# Altium footprint library Localisation_Node.PcbLib: 36 footprints (part 3 of 3)
Each footprint in its own frame and in the unit in brackets; x right, y up, seen from the top. Pads: shape width x height; smd on the part's side, far side on the other; paste and mask are expansions set on the pad; w line width, h text height; cw(c..) or ccw(c..) is an arc to the next point about the centre after c.
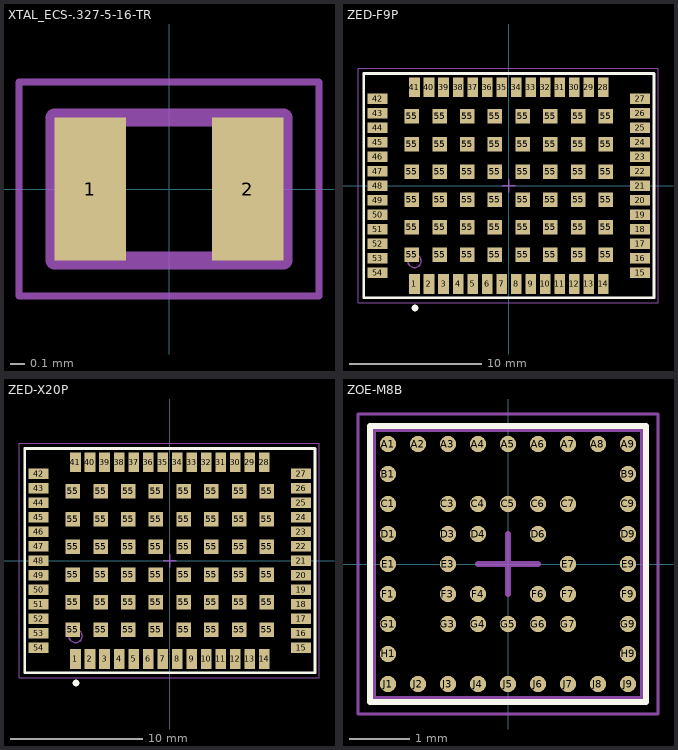
[diagram p2: the footprints below, top view; thin cyan lines are the x and y axes]

## XTAL_ECS-.327-5-16-TR [mm]
pads (2):
  rect 0.5x1 smd: 1(-0.55,0) 2(0.55,0)
Mechanical 13:
  lines w0.127: -0.8,-0.5 0.8,-0.5 0.8,0.5 -0.8,0.5 -0.8,-0.5
Mechanical 15:
  lines w0.05: -1.05,-0.75 1.05,-0.75 1.05,0.75 -1.05,0.75 -1.05,-0.75
3D body "ECS-.327-9-16-TR.STEP": height 0.51, standoff 0.01, extent -0.8,-0.5 0.8,0.5

## ZED-F9P [mm] "Multi-band GNSS receiver"
height 2.2
pads (102):
  rect 0.8x1.5 smd paste-2: 1(-7.15,-7.45) 2(-6.05,-7.45) 3(-4.95,-7.45) 4(-3.85,-7.45) 5(-2.75,-7.45) 6(-1.65,-7.45) 7(-0.55,-7.45) 8(0.55,-7.45) 9(1.65,-7.45) 10(2.75,-7.45) 11(3.85,-7.45) 12(4.95,-7.45) 13(6.05,-7.45) 14(7.15,-7.45) 28(7.15,7.45) 29(6.05,7.45) 30(4.95,7.45) 31(3.85,7.45) 32(2.75,7.45) 33(1.65,7.45) 34(0.55,7.45) 35(-0.55,7.45) 36(-1.65,7.45) 37(-2.75,7.45) 38(-3.85,7.45) 39(-4.95,7.45) 40(-6.05,7.45) 41(-7.15,7.45)
  rect 1.5x0.8 smd paste-2: 15(9.95,-6.6) 16(9.95,-5.5) 17(9.95,-4.4) 18(9.95,-3.3) 19(9.95,-2.2) 20(9.95,-1.1) 21(9.95,0) 22(9.95,1.1) 23(9.95,2.2) 24(9.95,3.3) 25(9.95,4.4) 26(9.95,5.5) 27(9.95,6.6) 42(-9.95,6.6) 43(-9.95,5.5) 44(-9.95,4.4) 45(-9.95,3.3) 46(-9.95,2.2) 47(-9.95,1.1) 48(-9.95,0) 49(-9.95,-1.1) 50(-9.95,-2.2) 51(-9.95,-3.3) 52(-9.95,-4.4) 53(-9.95,-5.5) 54(-9.95,-6.6)
  rect 1.1x1.1 smd paste-2: 55(-7.35,-5.25) 55(-7.35,-3.15) 55(-7.35,-1.05) 55(-7.35,1.05) 55(-7.35,3.15) 55(-7.35,5.25) 55(-5.25,-5.25) 55(-5.25,-3.15) 55(-5.25,-1.05) 55(-5.25,1.05) 55(-5.25,3.15) 55(-5.25,5.25) 55(-3.15,-5.25) 55(-3.15,-3.15) 55(-3.15,-1.05) 55(-3.15,1.05) 55(-3.15,3.15) 55(-3.15,5.25) 55(-1.05,-5.25) 55(-1.05,-3.15) 55(-1.05,-1.05) 55(-1.05,1.05) 55(-1.05,3.15) 55(-1.05,5.25) 55(1.05,-5.25) 55(1.05,-3.15) 55(1.05,-1.05) 55(1.05,1.05) 55(1.05,3.15) 55(1.05,5.25) 55(3.15,-5.25) 55(3.15,-3.15) 55(3.15,-1.05) 55(3.15,1.05) 55(3.15,3.15) 55(3.15,5.25) 55(5.25,-5.25) 55(5.25,-3.15) 55(5.25,-1.05) 55(5.25,1.05) 55(5.25,3.15) 55(5.25,5.25) 55(7.35,-5.25) 55(7.35,-3.15) 55(7.35,-1.05) 55(7.35,1.05) 55(7.35,3.15) 55(7.35,5.25)
Top Overlay:
  circle w0.25: c-7.112,-9.271 r0.125
  lines w0.2: -11,-8.5 -11,8.5 11,8.5 11,-8.5 -11,-8.5
Top Paste:
  drawing of 102 lines, arcs and shapes, not listed
Mechanical 12:
  circle w0.1: c-7.15,-5.715 r0.5
  lines w0.1: -11,-8.5 11,-8.5 11,8.5 -11,8.5 -11,-8.5
Mechanical 15:
  lines w0.05: -11.43,-8.89 11.303,-8.89 11.303,8.89 -11.43,8.89 -11.43,-8.89
  lines w0.1: -0.5,0 0.5,0 ; 0,-0.5 0,0.5
3D body "ZED_STEP_AP214.STEP": height 2.49, standoff 0.01, extent -11,-8.5 11,8.5

## ZED-X20P [mm] "Multi-band GNSS receiver"
height 2.2
pads (102):
  rect 0.8x1.5 smd paste-2: 1(-7.15,-7.45) 2(-6.05,-7.45) 3(-4.95,-7.45) 4(-3.85,-7.45) 5(-2.75,-7.45) 6(-1.65,-7.45) 7(-0.55,-7.45) 8(0.55,-7.45) 9(1.65,-7.45) 10(2.75,-7.45) 11(3.85,-7.45) 12(4.95,-7.45) 13(6.05,-7.45) 14(7.15,-7.45) 28(7.15,7.45) 29(6.05,7.45) 30(4.95,7.45) 31(3.85,7.45) 32(2.75,7.45) 33(1.65,7.45) 34(0.55,7.45) 35(-0.55,7.45) 36(-1.65,7.45) 37(-2.75,7.45) 38(-3.85,7.45) 39(-4.95,7.45) 40(-6.05,7.45) 41(-7.15,7.45)
  rect 1.5x0.8 smd paste-2: 15(9.95,-6.6) 16(9.95,-5.5) 17(9.95,-4.4) 18(9.95,-3.3) 19(9.95,-2.2) 20(9.95,-1.1) 21(9.95,0) 22(9.95,1.1) 23(9.95,2.2) 24(9.95,3.3) 25(9.95,4.4) 26(9.95,5.5) 27(9.95,6.6) 42(-9.95,6.6) 43(-9.95,5.5) 44(-9.95,4.4) 45(-9.95,3.3) 46(-9.95,2.2) 47(-9.95,1.1) 48(-9.95,0) 49(-9.95,-1.1) 50(-9.95,-2.2) 51(-9.95,-3.3) 52(-9.95,-4.4) 53(-9.95,-5.5) 54(-9.95,-6.6)
  rect 1.1x1.1 smd paste-2: 55(-7.35,-5.25) 55(-7.35,-3.15) 55(-7.35,-1.05) 55(-7.35,1.05) 55(-7.35,3.15) 55(-7.35,5.25) 55(-5.25,-5.25) 55(-5.25,-3.15) 55(-5.25,-1.05) 55(-5.25,1.05) 55(-5.25,3.15) 55(-5.25,5.25) 55(-3.15,-5.25) 55(-3.15,-3.15) 55(-3.15,-1.05) 55(-3.15,1.05) 55(-3.15,3.15) 55(-3.15,5.25) 55(-1.05,-5.25) 55(-1.05,-3.15) 55(-1.05,-1.05) 55(-1.05,1.05) 55(-1.05,3.15) 55(-1.05,5.25) 55(1.05,-5.25) 55(1.05,-3.15) 55(1.05,-1.05) 55(1.05,1.05) 55(1.05,3.15) 55(1.05,5.25) 55(3.15,-5.25) 55(3.15,-3.15) 55(3.15,-1.05) 55(3.15,1.05) 55(3.15,3.15) 55(3.15,5.25) 55(5.25,-5.25) 55(5.25,-3.15) 55(5.25,-1.05) 55(5.25,1.05) 55(5.25,3.15) 55(5.25,5.25) 55(7.35,-5.25) 55(7.35,-3.15) 55(7.35,-1.05) 55(7.35,1.05) 55(7.35,3.15) 55(7.35,5.25)
Top Overlay:
  circle w0.25: c-7.112,-9.271 r0.125
  lines w0.2: -11,-8.5 -11,8.5 11,8.5 11,-8.5 -11,-8.5
Top Paste:
  drawing of 102 lines, arcs and shapes, not listed
Mechanical 12:
  circle w0.1: c-7.15,-5.715 r0.5
  lines w0.1: -11,-8.5 11,-8.5 11,8.5 -11,8.5 -11,-8.5
Mechanical 15:
  lines w0.05: -11.43,-8.89 11.303,-8.89 11.303,8.89 -11.43,8.89 -11.43,-8.89
  lines w0.1: -0.5,0 0.5,0 ; 0,-0.5 0,0.5
3D body "ZED_STEP_AP214.STEP": height 2.49, standoff 0.01, extent -11,-8.5 11,8.5

## ZOE-M8B [mm] "LGA, 51-Leads, Body 4.50x4.50mmx1.20mm, Pitch 0.50mm"
height 1
pads (51):
  round 0.27 smd: A1(-2,2) A2(-1.5,2) A3(-1,2) A4(-0.5,2) A5(0,2) A6(0.5,2) A7(1,2) A8(1.5,2) A9(2,2) B1(-2,1.5) B9(2,1.5) C1(-2,1) C3(-1,1) C4(-0.5,1) C5(0,1) C6(0.5,1) C7(1,1) C9(2,1) D1(-2,0.5) D3(-1,0.5) D4(-0.5,0.5) D6(0.5,0.5) D9(2,0.5) E1(-2,0) E3(-1,0) E7(1,0) E9(2,0) F1(-2,-0.5) F3(-1,-0.5) F4(-0.5,-0.5) F6(0.5,-0.5) F7(1,-0.5) F9(2,-0.5) G1(-2,-1) G3(-1,-1) G4(-0.5,-1) G5(0,-1) G6(0.5,-1) G7(1,-1) G9(2,-1) H1(-2,-1.5) H9(2,-1.5) J1(-2,-2) J2(-1.5,-2) J3(-1,-2) J4(-0.5,-2) J5(0,-2) J6(0.5,-2) J7(1,-2) J8(1.5,-2) J9(2,-2)
Top Overlay:
  lines w0.1: -2.3,-2.3 2.3,-2.3 2.3,2.3 -2.3,2.3 -2.3,-2.3
Mechanical 12:
  lines w0.1: -2.25,-2.25 -2.25,2.25 2.25,2.25 2.25,-2.25 -2.25,-2.25
Mechanical 15:
  lines w0.05: -2.5,-2.5 -2.5,2.5 2.5,2.5 2.5,-2.5 -2.5,-2.5
  lines w0.1: -0.5,0 0.5,0 ; 0,-0.5 0,0.5
3D body "LGA81C50P9X9_450X450X120.step": height 1.2, standoff 0, extent -2.25,-2.25 2.25,2.25